# Altium footprint library MTGW_R09.PcbLib: 55 footprints (part 4 of 4)
Each footprint in its own frame and in the unit in brackets; x right, y up, seen from the top. Pads: shape width x height; smd on the part's side, far side on the other; paste and mask are expansions set on the pad; w line width, h text height; cw(c..) or ccw(c..) is an arc to the next point about the centre after c.
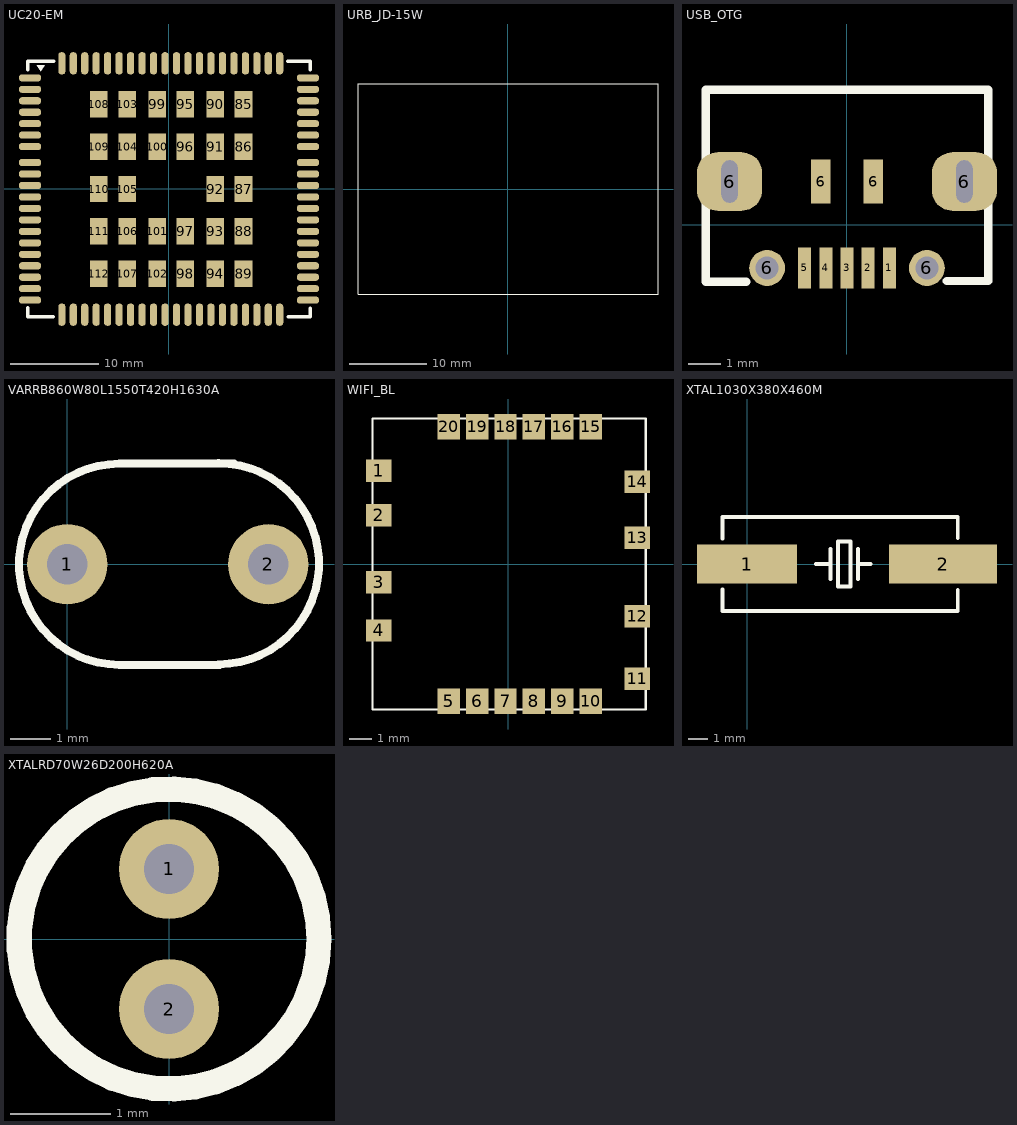
[diagram p3: the footprints below, top view; thin cyan lines are the x and y axes]

## UC20-EM [mil]
pads (108):
  rrect80% 98.43x31.5 smd: 1(-620.08,496.06) 2(-620.08,444.88) 3(-620.08,393.69) 4(-620.08,342.52) 5(-620.08,291.34) 6(-620.08,240.16) 7(-620.08,188.97) 8(-620.08,15.74) 9(-620.08,-35.44) 10(-620.08,-86.61) 11(-620.08,-137.8) 12(-620.08,-188.97) 13(-620.08,-240.16) 14(-620.08,-291.35) 15(-620.08,-342.52) 16(-620.08,-393.7) 17(-620.08,-444.88) 18(-620.08,-496.07) 37(620.08,-496.07) 38(620.08,-444.88) 39(620.08,-393.7) 40(620.08,-342.52) 41(620.08,-291.35) 42(620.08,-240.16) 43(620.08,-188.97) 44(620.08,-137.8) 45(620.08,-86.62) 46(620.08,-35.44) 47(620.08,15.74) 48(620.08,188.97) 49(620.08,240.16) 50(620.08,291.33) 51(620.08,342.52) 52(620.08,393.69) 53(620.08,444.88) 54(620.08,496.06) 141(-620.08,118.11) 142(-620.08,66.92) 143(620.08,66.92) 144(620.08,118.1)
  rrect80% 31.5x98.43 smd: 19(-375.98,-561.03) 20(-324.8,-561.03) 21(-273.62,-561.03) 22(-222.44,-561.02) 23(-171.26,-561.03) 24(-120.08,-561.03) 25(-68.9,-561.03) 26(-17.72,-561.02) 27(33.47,-561.02) 28(84.65,-561.03) 29(135.83,-561.03) 30(187.01,-561.02) 31(238.19,-561.02) 32(289.37,-561.03) 33(340.55,-561.03) 34(391.73,-561.02) 35(442.91,-561.02) 36(494.1,-561.02) 55(494.1,561.03) 56(442.91,561.03) 57(391.73,561.02) 58(340.55,561.03) 59(289.37,561.03) 60(238.19,561.03) 61(187.01,561.02) 62(135.83,561.03) 63(84.65,561.03) 64(33.47,561.03) 65(-17.72,561.03) 66(-68.9,561.02) 67(-120.08,561.03) 68(-171.26,561.03) 69(-222.44,561.03) 70(-273.62,561.02) 71(-324.8,561.03) 72(-375.98,561.03) 113(-427.16,561.03) 114(-478.35,561.03) 115(-427.16,-561.02) 116(-478.35,-561.03)
  rect 78.74x118.11 smd: 85(332.68,377.94) 86(332.68,188.98) 87(332.68,-0.01) 88(332.68,-188.97) 89(332.68,-377.95) 90(206.69,377.94) 91(206.69,188.97) 92(206.69,-0.01) 93(206.69,-188.97) 94(206.69,-377.95) 95(72.84,377.94) 96(72.84,188.97) 97(72.84,-188.97) 98(72.84,-377.95) 99(-53.15,377.94) 100(-53.15,188.97) 101(-53.15,-188.97) 102(-53.15,-377.95) 103(-187.01,377.95) 104(-187.01,188.97) 105(-187.01,-0.01) 106(-187.01,-188.98) 107(-187.01,-377.95) 108(-312.99,377.94) 109(-312.99,188.97) 110(-312.99,0) 111(-312.99,-188.97) 112(-312.99,-377.95)
Top Overlay:
  region: -572.83,525.58 -590.55,553.15 -555.12,553.14
  lines w16: -629.92,-529.53 -629.92,-570.87 -515.75,-570.86 ; -629.92,531.49 -629.92,570.87 -513.78,570.87 ; 529.53,570.86 629.92,570.87 629.92,531.5 ; 531.5,-570.87 629.92,-570.87 629.92,-531.49
3D body "User Library-UC20--3DModel-STEP-231308.STEP": height 98.43, standoff 0, extent -629.91,-570.15 629.93,571.59

## URB_JD-15W [mm]
Top Overlay:
  lines w0.1: -19.35,-13.6 -19.35,13.6 19.35,13.6 19.35,-13.6 -19.35,-13.6
3D body "URB_JD-15W.stp": height 9.5, standoff 0.3, extent -19.35,-13.6 19.35,13.6

## USB_OTG [mm]
pads (11):
  rect 0.4x1.25 smd: 1(1.3,-1.325) 2(0.65,-1.325) 3(0,-1.325) 4(-0.65,-1.325) 5(-1.3,-1.325)
  rrect70% 2x1.8 hole 1.3 slot 0.5 at 0 deg: 6(-3.6,1.325) 6(3.6,1.325)
  round 1.1 hole 0.7: 6(-2.45,-1.325) 6(2.45,-1.325)
  rect 0.6x1.35 smd: 6(-0.8,1.325) 6(0.8,1.325)
Top Overlay:
  lines w0.254: -3.086,-1.748 -4.331,-1.748 -4.331,4.144 4.331,4.144 4.331,-1.723 3.061,-1.723
3D body "User Library-ZX62D-AB-5P8.step": height 2.75, standoff -0.64, extent -4.312,-1.751 4.338,4.148

## VARRB860W80L1550T420H1630A [mm]
pads (2):
  round 2 hole 1: 1(0,0) 2(5,0)
Top Overlay:
  lines w0.2: 3.759,-2.485 ccw(c3.759,0.015) 3.759,2.515 ; 3.785,-2.498 1.3,-2.498 cw(c1.3,0.002) 1.3,2.502 4.14,2.502

## WIFI_BL [mm]
pads (20):
  rect 1.15x1 smd: 1(-5.775,4.17) 2(-5.775,2.17) 3(-5.775,-0.81) 4(-5.775,-2.97) 11(5.775,-5.13) 12(5.775,-2.33) 13(5.775,1.17) 14(5.775,3.67)
  rect 1x1.15 smd: 5(-2.65,-6.125) 6(-1.38,-6.125) 7(-0.11,-6.125) 8(1.15,-6.125) 9(2.43,-6.125) 10(3.7,-6.125) 15(3.7,6.125) 16(2.43,6.125) 17(1.15,6.125) 18(-0.11,6.125) 19(-1.38,6.125) 20(-2.65,6.125)
Top Overlay:
  lines w0.1: -6.05,-6.5 -6.05,6.5 6.15,6.5 6.15,-6.5 -6.05,-6.5
3D body: height 1.5, standoff 0, extent -6.046,-6.505 6.146,6.5

## XTAL1030X380X460M [mm]
pads (2):
  rect 5.1x2 smd: 1(0,0)
  rect 5.5x2 smd: 2(10,0)
Top Overlay:
  lines w0.2: -1.25,-1.29 -1.25,-2.4 10.75,-2.4 10.75,-1.315 ; -1.25,1.29 -1.25,2.4 10.75,2.4 10.75,1.315
  lines w0.203: 3.506,0 4.268,0 ; 4.268,-0.762 4.268,0.762 ; 5.665,-0.762 5.665,0.762 ; 5.665,0 6.3,0 ; 4.649,-1.143 5.284,-1.143 5.284,1.143 4.649,1.143 4.649,-1.143
3D body "User Library-ECS-240-20-5PX-TR.STEP": height 4.3, standoff 0, extent -1.646,-2.406 11.554,2.394

## XTALRD70W26D200H620A [mm]
pads (2):
  round 1 hole 0.5: 1(0,0.7) 2(0,-0.7)
Top Overlay:
  circle w0.254: c0,0 r1.5